# Altium schematic symbol library DRV8701PRGER.SchLib: 1 symbol
Pins are listed as number, name and electrical type; pins without a type are passive.

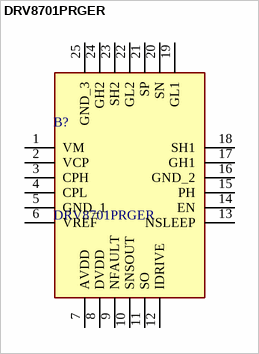
[diagram p0: symbol DRV8701PRGER]

## DRV8701PRGER
designator B?
Motor / Motion / Ignition Controllers & Drivers Brushed DC Motor Gate Driver (PH/EN, PWM Ctrl) 24-VQFN -40 to 125; Manufacturer_Name: Texas Instruments; Geometry.Height: 1mm; Manufacturer_Part_Number: DRV8701PRGER; Mouser Part Number: 595-DRV8701PRGER; Mouser Price/Stock: https://www.mouser.co.uk/ProductDetail/Texas-Instruments/DRV8701PRGER?qs=UfUFg%2FkmHHH%2F%252BOfCOaHj7g%3D%3D; Arrow Part Number: DRV8701PRGER; Arrow Price/Stock: https://www.arrow.com/en/products/drv8701prger/texas-instruments.html?utm_currency=USD&region=nac; Datasheet Link: http://www.ti.com/lit/ds/symlink/drv8701.pdf
footprint QFN50P400X400X100-25N-D
pins: 1 VM, 2 VCP, 3 CPH, 4 CPL, 5 GND_1, 6 VREF, 7 AVDD, 8 DVDD, 9 NFAULT, 10 SNSOUT, 11 SO, 12 IDRIVE, 13 NSLEEP, 14 EN, 15 PH, 16 GND_2, 17 GH1, 18 SH1, 19 GL1, 20 SN, 21 SP, 22 GL2, 23 SH2, 24 GH2, 25 GND_3